# Altium footprint library Connectors.PcbLib: 319 footprints (part 1 of 20)
Each footprint in its own frame and in the unit in brackets; x right, y up, seen from the top. Pads: shape width x height; smd on the part's side, far side on the other; paste and mask are expansions set on the pad; w line width, h text height; cw(c..) or ccw(c..) is an arc to the next point about the centre after c.
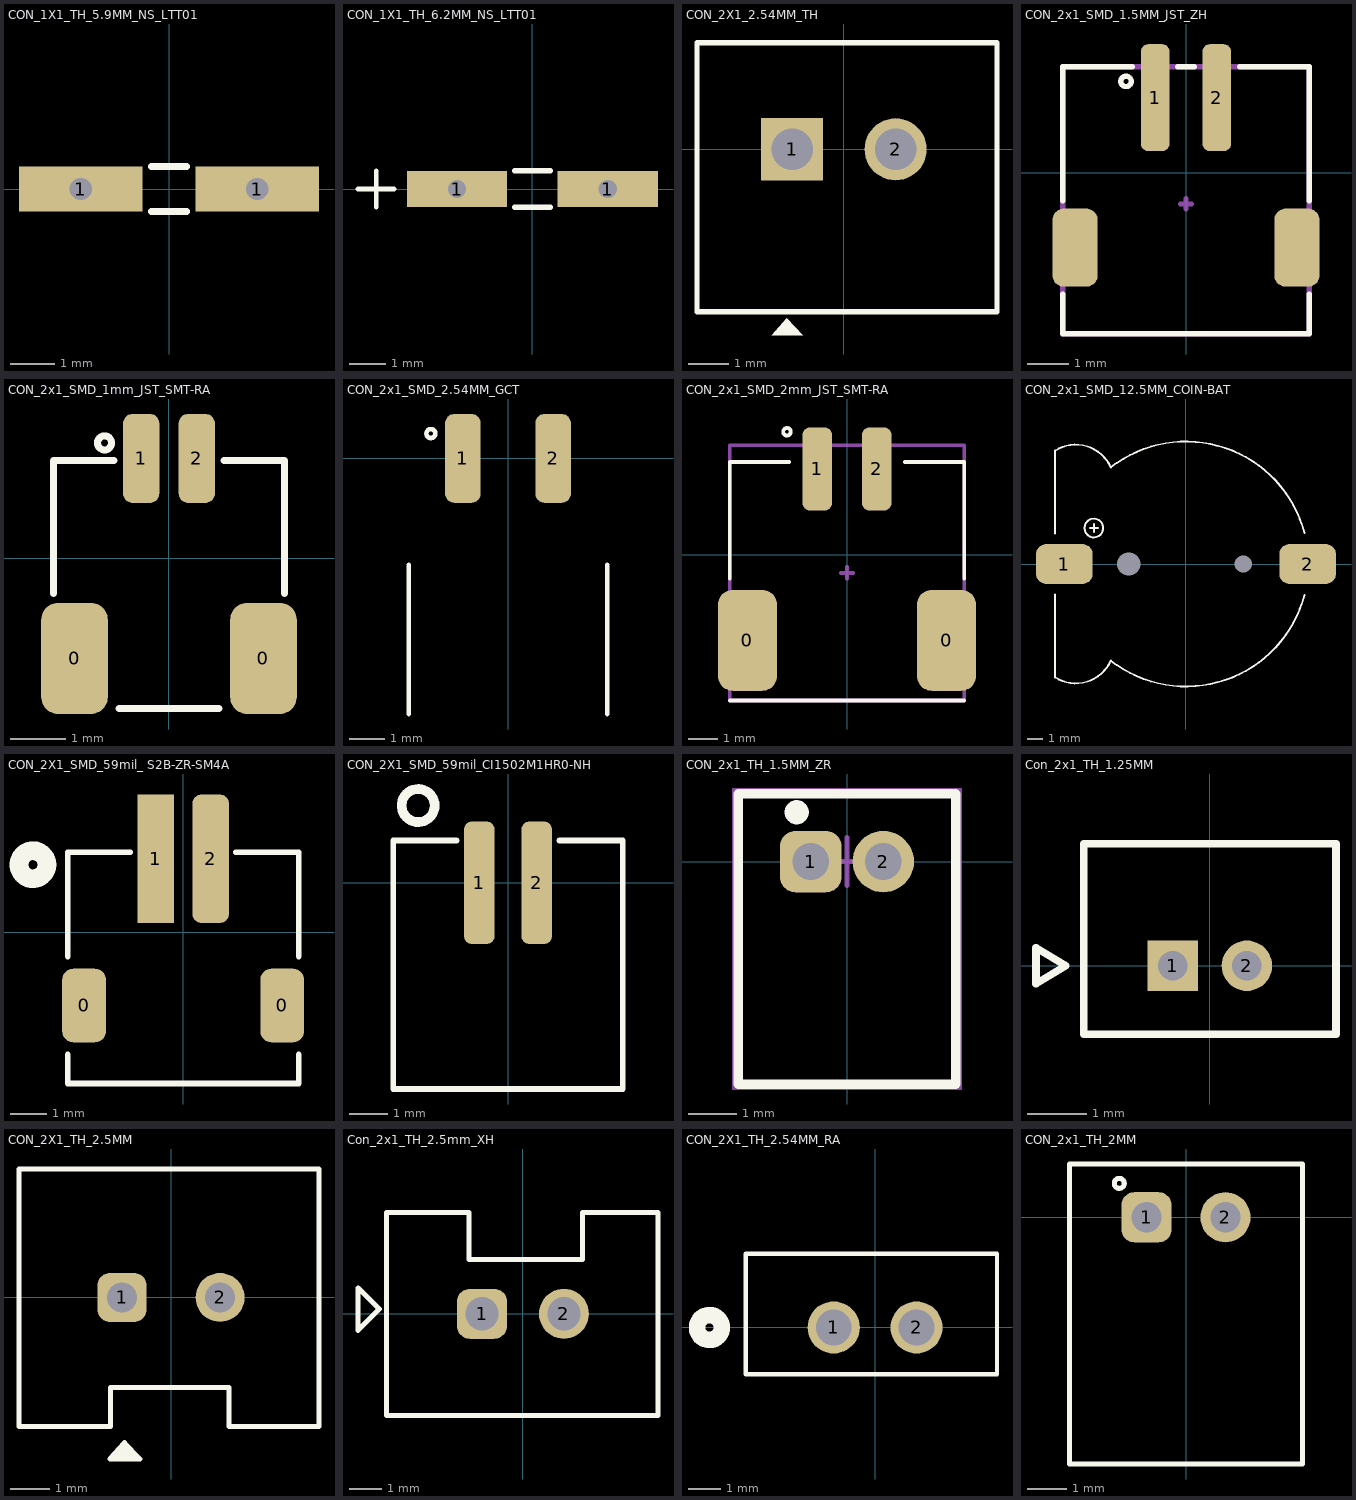
[diagram p0: the footprints below, top view; thin cyan lines are the x and y axes]

## CON_1X1_TH_5.9MM_NS_LTT01 [mil] "/20220829/V-A.Patino"
pads (2):
  rect 110x40 hole 20 square: 1(-78.74,0) 1(78.74,0)
Top Overlay:
  lines w6: -15.75,-20 15.75,-20 ; -15.75,20 15.75,20
3D body "Negative Plate.stp": height 354.33, standoff -41.34, extent -187.01,-536.06 187,23

## CON_1X1_TH_6.2MM_NS_LTT01 [mil] "/20220829/V-A.Patino"
pads (2):
  rect 110x40 hole 20 square: 1(-82.68,0) 1(82.68,0)
Top Overlay:
  lines w5: -191.36,0 -151.36,0 ; -171.36,-20 -171.36,20
  lines w6: -19.68,-20 19.68,-20 ; -19.68,20 19.68,20
3D body "Positive Plate.stp": height 413.39, standoff -33.46, extent -187.01,-74.8 187.01,27.56

## CON_2X1_2.54MM_TH [mil] "/20220107/J-E.Pachon"
pads (2):
  rect 60x60 hole 40: 1(-50,0)
  round 60 hole 40: 2(50,0)
Top Overlay:
  region: -69.9,-179.8 -39.9,-179.8 -55.46,-163.48
  lines w5: -142,-157 147.99,-157 147.99,103 -142,103 -142,-157
3D body "705430036.stp": height 464.96, standoff -130.04, extent -143.01,-158.01 146.98,101.99

## CON_2x1_SMD_1.5MM_JST_ZH [mm] "/ 20190222 / C-A.Serna.A"
pads (4):
  rrect50% 0.7x2.6 smd: 1(-0.75,1.825) 2(0.75,1.825)
  rrect50% 1.1x1.9 smd: ""(-2.7,-1.825) ""(2.7,-1.825)
Top Overlay:
  circle w0.127: c-1.46,2.22 r0.127
  lines w0.127: -3,-2.95 -3,-3.921 3,-3.921 3,-2.95 ; -3,-0.69 -3,2.579 -1.3,2.579 ; -0.2,2.579 0.2,2.579 ; 1.3,2.579 3,2.579 3,-0.69
Mechanical 15:
  lines w0.127: -0.127,-0.76 0.127,-0.76 ; 0,-0.887 0,-0.633 ; 0,-0.76 cw(c0,-0.76) 0,-0.76 ; 3,-3.921 -3,-3.921 -3,2.579 3,2.579 3,-3.921 ; 3,-3.921 3,-3.921
3D body "Connector_S2B-ZR-SM4A-TF.STEP": height 3.72, standoff 0.02, extent -3,-3.921 3,2.579

## CON_2x1_SMD_1mm_JST_SMT-RA [mm] "/ 20200731/ N-A.Potosi"
pads (4):
  rrect50% 1.2x2 smd: 0(-1.7,-1.8) 0(1.7,-1.8)
  rrect50% 0.65x1.6 smd: 1(-0.5,1.8) 2(0.5,1.8)
Top Overlay:
  circle w0.127: c-1.16,2.08 r0.127
  lines w0.127: -2.083,-0.633 -2.083,1.767 -0.991,1.767 ; -0.9,-2.7 0.9,-2.7 ; 0.991,1.767 2.083,1.767 2.083,-0.633
3D body "User Library-JST_SM02B-SRSS-TB.step": height 3, standoff 0, extent -1.994,-2.593 1.994,2.393

## CON_2x1_SMD_2.54MM_GCT [mm] "/ 20190902 / N-A Potosi"
pads (2):
  rrect50% 1x2.5 smd: 1(-1.27,0) 2(1.27,0)
Top Overlay:
  circle w0.127: c-2.17,0.7 r0.127
  lines w0.127: -2.8,-7.2 -2.8,-3 ; 2.8,-7.2 2.8,-3
3D body "BG300-02-A-L-A.stp": height 2.51, standoff 0.01, extent -2.8,-10.875 2.83,1.075

## CON_2x1_SMD_2mm_JST_SMT-RA [mm] "/ 20201005/ N-A.Potosi"
pads (4):
  rrect50% 2x3.4 smd: 0(-3.35,-2.885) 0(3.35,-2.885)
  rrect50% 1x2.8 smd: 1(-1,2.885) 2(1,2.885)
Top Overlay:
  circle w0.127: c-2.02,4.135 r0.127
  lines w0.127: -3.95,-4.915 3.95,-4.915 ; -3.95,-0.815 -3.95,3.115 -1.95,3.115 ; 1.95,3.115 3.95,3.115 3.95,-0.815
Mechanical 15:
  lines w0.127: -0.2,-0.615 0.2,-0.615 ; 0,-0.815 0,-0.415 ; -3.95,-4.915 3.95,-4.915 3.95,3.685 -3.95,3.685 -3.95,-4.915
3D body "PWR_CONNECT_2mm_S2B-PH-SM4-TB.step": height 5.6, standoff 0, extent -3.95,-4.915 3.95,3.685

## CON_2x1_SMD_12.5MM_COIN-BAT [mm] "/ 20191210 / C-D Viveros"
pads (4):
  rrect50% 3.7x2.6 smd: 1(-7.95,0) 2(7.95,0)
  round 0 hole 1.524 paste-2539.97 mask+0.102: ""(-3.75,0)
  round 0 hole 1.143 paste-2539.97 mask+0.102: ""(3.75,0)
Top Overlay:
  circle w0.127: c-6.02,2.35 r0.61
  lines w0.127: -8.549,-1.978 -8.549,-7.404 ccw(c-7.2,-5.3) -4.914,-6.312 ; -8.549,1.978 -8.549,7.404 cw(c-7.2,5.3) -4.914,6.313 ; -6.29,2.35 -6.02,2.35 ; -6.02,2.08 -6.02,2.35 ; -6.02,2.62 -6.02,2.35 ; -5.75,2.35 -6.02,2.35 ; -4.914,-6.313 ccw(c0,0) 7.736,-2.039 ; -4.912,6.315 cw(c0,0) 7.736,2.039
3D body "ALSRobot-CR1220.STEP": height 4.11, standoff -0.83, extent -9.47,-7.497 9.03,7.5

## CON_2X1_SMD_59mil_ S2B-ZR-SM4A [mm] "/20210429/V-A.patino"
pads (4):
  rrect50% 1.194x2.007 smd: 0(-2.7,-2) 0(2.7,-2)
  rect 1x3.505 smd: 1(-0.749,2)
  rrect50% 1x3.505 smd: 2(0.749,2)
Top Overlay:
  circle w0.508: c-4.094,1.838 r0.381
  lines w0.152: -3.15,-3.336 -3.15,-4.127 3.15,-4.127 3.15,-3.336 ; -3.15,-0.664 -3.15,2.172 -1.438,2.172 ; 1.438,2.172 3.15,2.172 3.15,-0.664
3D body: height 3.7, standoff 0, extent -3.15,-4.127 3.15,2.172

## CON_2X1_SMD_59mil_CI1502M1HR0-NH [mm] "/20210329/V-A.Patino"
pads (2):
  rrect50% 0.8x3.2 smd: 1(-0.75,0) 2(0.75,0)
Top Overlay:
  circle w0.254: c-2.35,2.02 r0.433
  lines w0.152: -1.348,1.108 -3,1.108 -3,-5.392 3,-5.392 3,1.108 1.348,1.108
3D body "CI1502M1HR0-NH.STEP": height 3.76, standoff 0.01, extent -3.01,-5.36 2.99,1.14

## CON_2x1_TH_1.5MM_ZR [mm] "/ 20191210 / C-D Viveros"
height 3.7
pads (2):
  rrect50% 1.27x1.27 hole 0.762: 1(-0.75,0)
  round 1.27 hole 0.762: 2(0.75,0)
Top Overlay:
  circle w0.25: c-1.04,1.02 r0.125
  lines w0.2: -2.25,-4.6 -2.25,1.4 2.25,1.4 2.25,-4.6 -2.25,-4.6
Top 3D Body (Mech13):
  lines w0.1: -2.25,-4.6 2.25,-4.6 2.25,1.4 -2.25,1.4 -2.25,-4.6
Mechanical 15:
  lines w0.05: -2.35,-4.7 -2.35,1.5 2.35,1.5 2.35,-4.7 -2.35,-4.7
  lines w0.1: -0.5,0 0.5,0 ; 0,-0.5 0,0.5
3D body "S2B-ZR.STEP": height 3.8, standoff -2.6, extent -2.25,-4.6 2.25,1.4

## Con_2x1_TH_1.25MM [mm] "/ 20221116/ J-A.Sepulveda"
pads (2):
  rect 0.85x0.85 / inner round 0.85 / far side rect 0.85x0.85 hole 0.5 mask+0.076: 1(-0.625,0)
  round 0.85 hole 0.5 mask+0.076: 2(0.625,0)
Top Overlay:
  lines w0.127: -2.925,-0.3 -2.925,0.3 ; -2.925,-0.3 -2.425,0 ; -2.925,-0.3 -2.925,0.3 ; -2.925,-0.3 -2.425,0 ; -2.925,0.3 -2.425,0 ; -2.925,0.3 -2.425,0 ; -2.125,-1.15 2.125,-1.15 2.125,2.05 -2.125,2.05 -2.125,-1.15
3D body "step_temp.STEP": height 4.21, standoff -2.29, extent -2.125,-1.15 2.125,2.05

## CON_2X1_TH_2.5MM [mm] "/ 20200512 / J-P.Vargas.A"
pads (2):
  rrect50% 1.25x1.25 hole 0.762: 1(-1.25,0)
  round 1.25 hole 0.762: 2(1.25,0)
Top Overlay:
  region: -1.56,-4.12 -0.798,-4.12 -1.193,-3.705
  lines w0.127: -3.879,-3.298 -3.879,3.275 3.773,3.275 3.773,-3.298 1.473,-3.298 1.473,-2.3 -1.545,-2.3 -1.545,-3.298 -3.879,-3.298 ; -1.56,-4.12 -0.798,-4.12 -1.193,-3.705 -1.56,-4.12
3D body "c-2132415-2-f-3d.stp": height 8.81, standoff -3.39, extent -3.796,-3.2 3.704,3.2

## Con_2x1_TH_2.5mm_XH [mil] "/20201013/C-A.Serna.A"
height 385.83
pads (2):
  rrect50% 60x60 hole 40: 1(-49.21,0)
  round 60 hole 40: 2(49.21,0)
Top Overlay:
  lines w6: -163.78,121.64 -163.78,-122.05 162.2,-122.05 162.2,121.64 71.67,121.64 71.67,65.37 -64.96,65.37 -64.96,121.64 -163.39,121.64 ; -198.23,-19.88 -198.23,31.3 -172.64,5.71 -198.23,-19.88
3D body "User Library-XH2_54_2PIN.STEP": height 280.59, standoff -152.48, extent -157.87,-117.32 157.09,118.9
3D body "xhp-2.STEP": height 366.14, standoff 61.02, extent -138.59,-106.7 148.81,117.71

## CON_2X1_TH_2.54MM_RA [mil] "20220222 / E.Naranjo"
pads (2):
  round 63 hole 43 mask+0: 1(-50,0) 2(50,0)
Top Overlay:
  circle w20: c-200,0 r15
  lines w5: -156.2,-56.36 -156.2,88.94 96.54,88.94 147.16,88.94 147.16,-56.36 -105.58,-56.36 -156.2,-56.36
3D body: height 10, standoff 0, extent -50,0 -40,10
3D body "705530036.stp": height 260.5, standoff -144.5, extent -148.26,-31.28 141.73,503.72

## CON_2x1_TH_2MM [mm] "/20190307/N-A.Potosi"
pads (2):
  rrect50% 1.27x1.27 hole 0.762: 1(-1,0)
  round 1.27 hole 0.762: 2(1,0)
Top Overlay:
  circle w0.127: c-1.69,0.86 r0.127
  lines w0.127: -2.95,-6.25 -2.95,1.35 2.95,1.35 2.95,-6.25 -2.95,-6.25
3D body "S2B-PH-K-S(LF)(SN)--3DModel-STEP-56544.STEP": height 4.8, standoff -3.38, extent -2.96,-6.27 2.94,1.33